# EAGLE library part 6213XX21921_62131021921 (library WR-PHD)
WR-PHD 2.00 mm SMT Dual Pin Header Article Properties Pins 4 unitless; 6 unitless; 8 unitless; 10 unitless; 14 unitless; 16 unitless; 20 unitless; 24 unitless; 32 unitless; 44 unitless General Information Operating Temperature -40 °C up to +105 °C Compliance Lead free / RoHS Pitch 2 mm Durability 50 Cycles Rows Dual Gender Pin Header Type Straight Material Properties Insulator Material PA9T Insulator Flammability Rating UL94 V-0 Contact Material Copper Alloy Contact Plating Gold Contact Type Stamped Certification UL Approval E323964 Packaging Properties Packaging Tape and Reel with Cap; Tube Electrical Properties IR 2 A Withstanding Voltage 500 V (AC) Contact Resistance 20 mΩ RISO 1000 MΩ <https://www.we-online.com/components/media/o57941v209%20Family_WR-PHD_Dual_SMT_Pin_Header_621xxx21921.jpg> Details see: www.we-online.com/en/components/products/PHD_2_00_SMT_DUAL_PIN_HEADER_6210XX21921 <www.we-online.com/catalog/PHD_2_00_SMT_DUAL_PIN_HEADER_6210XX21921/?utm_source=eagle_model&utm_medium=description_link&utm_campaign=eisos_eagle> Updated by Ella 2024-01-31 2024 (C) Würth Elektronik
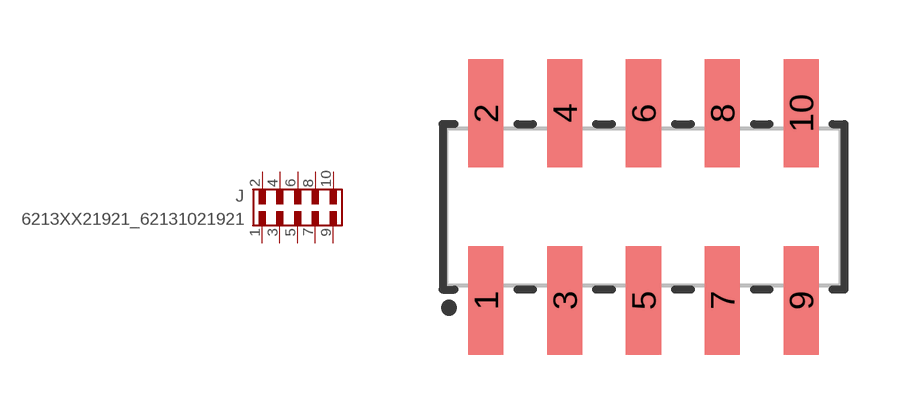
[diagram p306: symbol with the pads of 62131021921; footprint 62131021921]

Designator prefix J

## 6213XX21921_62131021921 (DATASHEET-URL: https://www.we-online.com/redexpert/spec/62131021921?ae; GENDER: Pin Header; IR: 2A; MOUNT: SMT; PACKAGING: Tape and Reel with Cap; PART-NUMBER: 62131021921; PINS: 10; PITCH: 2.00 mm; ROWS: Dual; TYPE: Straight; VALUE: 62131021921)  [62131021921]
1  1  pas
2  2  pas
3  3  pas
4  4  pas
5  5  pas
6  6  pas
7  7  pas
8  8  pas
9  9  pas
10  10  pas

## Footprint 62131021921 (pad centres in mm)
WR-PHD 2.00 mm SMD Dual Pin Header (Reel), 10Pins
smd 0.89 x 2.75: 1 -4,-2.375; 2 -4,2.375; 3 -2,-2.375; 4 -2,2.375; 5 0,-2.375; 6 0,2.375; 7 2,-2.375; 8 2,2.375; 9 4,-2.375; 10 4,2.375